# Altium footprint library RPI-Router.PcbLib: 49 footprints (part 3 of 4)
Each footprint in its own frame and in the unit in brackets; x right, y up, seen from the top. Pads: shape width x height; smd on the part's side, far side on the other; paste and mask are expansions set on the pad; w line width, h text height; cw(c..) or ccw(c..) is an arc to the next point about the centre after c.
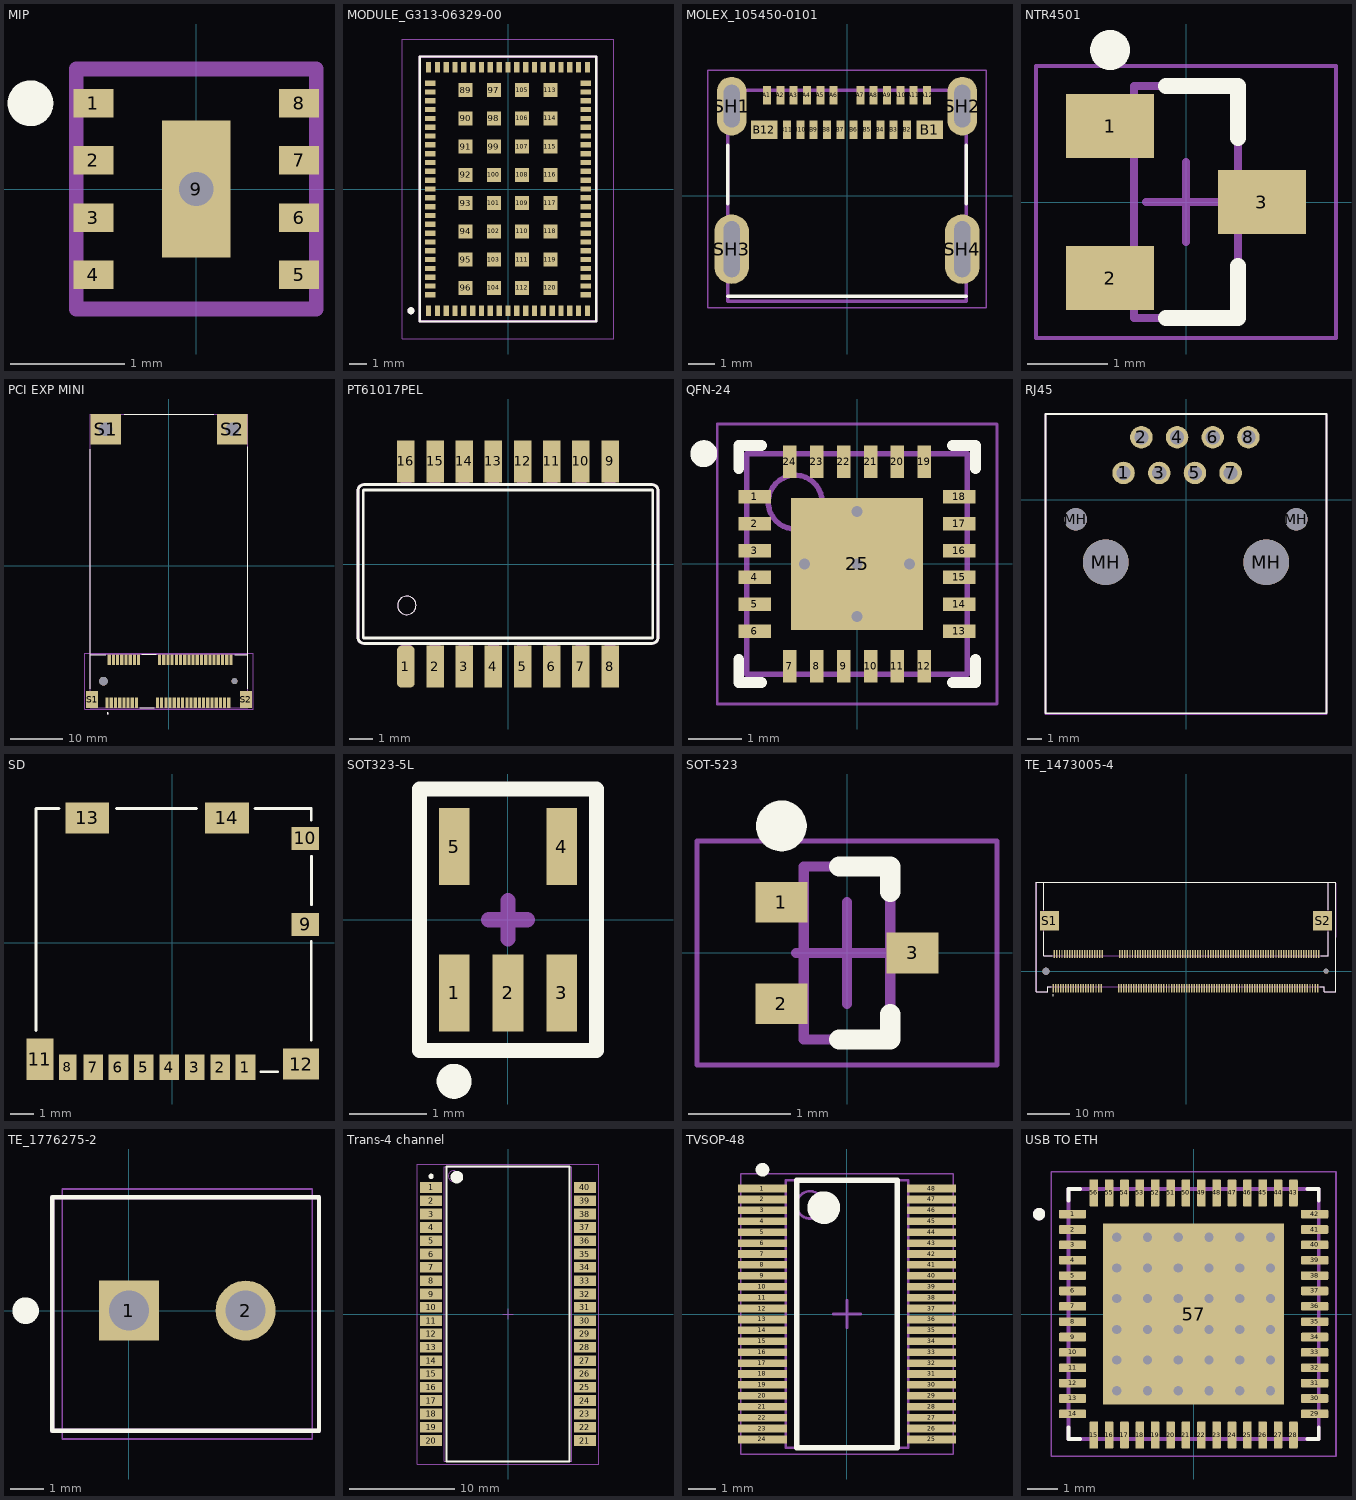
[diagram p2: the footprints below, top view; thin cyan lines are the x and y axes]

## MIP [mm]
pads (9):
  rect 0.35x0.25 smd: 1(-0.9,0.75) 2(-0.9,0.25) 3(-0.9,-0.25) 4(-0.9,-0.75) 5(0.9,-0.75) 6(0.9,-0.25) 7(0.9,0.25) 8(0.9,0.75)
  rect 0.6x1.2 smd: 9(0,0)
via 0,0 diameter 0.6 hole 0.3
Top Overlay:
  circle w0.2: c-1.45,0.75 r0.1
Top Paste:
  region: -0.28,0.41 0.28,0.41 0.28,-0.41 -0.28,-0.41
Mechanical 13:
  lines w0.127: -1.05,-1.05 -1.05,1.05 ; -1.05,-1.05 1.05,-1.05 ; -1.05,-1.05 -1.05,1.05 ; -1.05,-1.05 1.05,-1.05 ; -1.05,1.05 1.05,1.05 ; -1.05,1.05 1.05,1.05 ; 1.05,-1.05 1.05,1.05 ; 1.05,-1.05 1.05,1.05
3D body: height 0.8, standoff 0, extent -1.05,-1.05 1.05,1.05

## MODULE_G313-06329-00 [mm]
pads (120):
  rect 0.3x0.6 smd: 1(-4.5,-6.9) 2(-4,-6.9) 3(-3.5,-6.9) 4(-3,-6.9) 5(-2.5,-6.9) 6(-2,-6.9) 7(-1.5,-6.9) 8(-1,-6.9) 9(-0.5,-6.9) 10(0,-6.9) 11(0.5,-6.9) 12(1,-6.9) 13(1.5,-6.9) 14(2,-6.9) 15(2.5,-6.9) 16(3,-6.9) 17(3.5,-6.9) 18(4,-6.9) 19(4.5,-6.9) 45(4.5,6.9) 46(4,6.9) 47(3.5,6.9) 48(3,6.9) 49(2.5,6.9) 50(2,6.9) 51(1.5,6.9) 52(1,6.9) 53(0.5,6.9) 54(0,6.9) 55(-0.5,6.9) 56(-1,6.9) 57(-1.5,6.9) 58(-2,6.9) 59(-2.5,6.9) 60(-3,6.9) 61(-3.5,6.9) 62(-4,6.9) 63(-4.5,6.9)
  rect 0.6x0.3 smd: 20(4.4,-6) 21(4.4,-5.5) 22(4.4,-5) 23(4.4,-4.5) 24(4.4,-4) 25(4.4,-3.5) 26(4.4,-3) 27(4.4,-2.5) 28(4.4,-2) 29(4.4,-1.5) 30(4.4,-1) 31(4.4,-0.5) 32(4.4,0) 33(4.4,0.5) 34(4.4,1) 35(4.4,1.5) 36(4.4,2) 37(4.4,2.5) 38(4.4,3) 39(4.4,3.5) 40(4.4,4) 41(4.4,4.5) 42(4.4,5) 43(4.4,5.5) 44(4.4,6) 64(-4.4,6) 65(-4.4,5.5) 66(-4.4,5) 67(-4.4,4.5) 68(-4.4,4) 69(-4.4,3.5) 70(-4.4,3) 71(-4.4,2.5) 72(-4.4,2) 73(-4.4,1.5) 74(-4.4,1) 75(-4.4,0.5) 76(-4.4,0) 77(-4.4,-0.5) 78(-4.4,-1) 79(-4.4,-1.5) 80(-4.4,-2) 81(-4.4,-2.5) 82(-4.4,-3) 83(-4.4,-3.5) 84(-4.4,-4) 85(-4.4,-4.5) 86(-4.4,-5) 87(-4.4,-5.5) 88(-4.4,-6)
  rect 0.8x0.8 smd: 89(-2.4,5.6) 90(-2.4,4) 91(-2.4,2.4) 92(-2.4,0.8) 93(-2.4,-0.8) 94(-2.4,-2.4) 95(-2.4,-4) 96(-2.4,-5.6) 97(-0.8,5.6) 98(-0.8,4) 99(-0.8,2.4) 100(-0.8,0.8) 101(-0.8,-0.8) 102(-0.8,-2.4) 103(-0.8,-4) 104(-0.8,-5.6) 105(0.8,5.6) 106(0.8,4) 107(0.8,2.4) 108(0.8,0.8) 109(0.8,-0.8) 110(0.8,-2.4) 111(0.8,-4) 112(0.8,-5.6) 113(2.4,5.6) 114(2.4,4) 115(2.4,2.4) 116(2.4,0.8) 117(2.4,-0.8) 118(2.4,-2.4) 119(2.4,-4) 120(2.4,-5.6)
Top Overlay:
  circle w0.2: c-5.5,-6.9 r0.1
  lines w0.127: -5,-7.514 5,-7.514 5,7.514 -5,7.514 -5,-7.514
Mechanical 13:
  circle w0.2: c-5.5,-6.9 r0.1
  lines w0.127: -5,-7.5 -5,7.5 5,7.5 5,-7.5 -5,-7.5
Mechanical 15:
  lines w0.05: -6,-8.5 -6,8.5 6,8.5 6,-8.5 -6,-8.5

## MOLEX_105450-0101 [mm]
pads (28):
  rect 0.3x0.7 smd: A1(-3,3.77) A2(-2.5,3.77) A3(-2,3.77) A4(-1.5,3.77) A5(-1,3.77) A6(-0.5,3.77) A7(0.5,3.77) A8(1,3.77) A9(1.5,3.77) A10(2,3.77) A11(2.5,3.77) A12(3,3.77) B2(2.25,2.47) B3(1.75,2.47) B4(1.25,2.47) B5(0.75,2.47) B6(0.25,2.47) B7(-0.25,2.47) B8(-0.75,2.47) B9(-1.25,2.47) B10(-1.75,2.47) B11(-2.25,2.47)
  rect 1x0.7 smd: B1(3.1,2.47) B12(-3.1,2.47)
  oval 1.1x2.2 hole 0.6 slot 1.6 at 90 deg: SH1(-4.32,3.36) SH2(4.32,3.36)
  oval 1.3x2.6 hole 0.6 slot 2.1 at 90 deg: SH3(-4.32,-2) SH4(4.32,-2)
Top Overlay:
  lines w0.127: -4.47,-3.77 4.47,-3.77 ; -4.47,-0.3 -4.47,1.9 ; 4.47,-0.3 4.47,1.9
Mechanical 13:
  lines w0.127: -4.47,-3.95 4.47,-3.95 4.47,3.95 -4.47,3.95 -4.47,-3.95
Mechanical 15:
  lines w0.05: -5.22,-4.2 5.22,-4.2 5.22,4.71 -5.22,4.71 -5.22,-4.2
3D body "1054500101.stp": height 3.23, standoff -0.73, extent -4.47,-3.9 4.47,4

## NTR4501 [mm]
height 1
pads (3):
  rect 1.1x0.8 smd: 1(-0.95,0.95) 2(-0.95,-0.95) 3(0.95,0)
Top Overlay:
  circle w0.25: c-0.95,1.9 r0.125
  lines w0.2: -0.25,-1.45 0.65,-1.45 0.65,-0.8 ; -0.25,1.45 0.65,1.45 0.65,0.8
Mechanical 13:
  lines w0.1: -0.65,-1.45 0.65,-1.45 0.65,1.45 -0.65,1.45 -0.65,-1.45
Mechanical 15:
  lines w0.05: -1.875,-1.7 1.875,-1.7 1.875,1.7 -1.875,1.7 -1.875,-1.7
  lines w0.1: -0.5,0 0.5,0 ; 0,-0.5 0,0.5
3D body: height 1, standoff 0.05, extent -0.65,-1.45 0.65,1.45

## PCI EXP MINI [mm]
pads (58):
  rect 0.6x2 smd: 1(-11.8,-26.075) 2(-11.4,-17.875) 3(-11,-26.075) 4(-10.6,-17.875) 5(-10.2,-26.075) 6(-9.8,-17.875) 7(-9.4,-26.075) 8(-9,-17.875) 9(-8.6,-26.075) 10(-8.2,-17.875) 11(-7.8,-26.075) 12(-7.4,-17.875) 13(-7,-26.075) 14(-6.6,-17.875) 15(-6.2,-26.075) 16(-5.8,-17.875) 17(-2.2,-26.075) 18(-1.8,-17.875) 19(-1.4,-26.075) 20(-1,-17.875) 21(-0.6,-26.075) 22(-0.2,-17.875) 23(0.2,-26.075) 24(0.6,-17.875) 25(1,-26.075) 26(1.4,-17.875) 27(1.8,-26.075) 28(2.2,-17.875) 29(2.6,-26.075) 30(3,-17.875) 31(3.4,-26.075) 32(3.8,-17.875) 33(4.2,-26.075) 34(4.6,-17.875) 35(5,-26.075) 36(5.4,-17.875) 37(5.8,-26.075) 38(6.2,-17.875) 39(6.6,-26.075) 40(7,-17.875) 41(7.4,-26.075) 42(7.8,-17.875) 43(8.2,-26.075) 44(8.6,-17.875) 45(9,-26.075) 46(9.4,-17.875) 47(9.8,-26.075) 48(10.2,-17.875) 49(10.6,-26.075) 50(11,-17.875) 51(11.4,-26.075) 52(11.8,-17.875)
  rect 2.3x3.2 smd: S1(-14.65,-25.475) S2(14.65,-25.475)
  rect 5.8x5.8 hole 2.6: S1(-12.1,26.075) S2(12.1,26.075)
  round 1.65 hole 1.65 unplated: ""(-12.5,-21.975)
  round 1.15 hole 1.15 unplated: ""(12.5,-21.975)
Top Overlay:
  circle w0.2: c-11.712,-28.131 r0.1
  lines w0.127: -5.58,-27.075 -2.82,-27.075 ; -5.18,-16.875 -2.42,-16.875
  lines w0.2: -15,-23.4 -15,22.25 ; -15,-16.9 -12.05,-16.9 ; -8.5,28.95 8.5,28.95 ; 12.5,-16.9 15,-16.9 ; 15,-23.4 15,22.7
Mechanical 13:
  circle w0.2: c-11.712,-28.131 r0.1
  lines w0.127: -15,-23.555 -15,-16.875 ; -12.02,-16.875 -15,-16.875 ; 12.42,-16.875 15,-16.875 ; 14.998,28.975 -15,28.975 -15,-16.875 ; 15,-23.555 15,-16.875 ; 15,28.975 15,-16.875 ; -15,-16.875 15,-16.875 ; -15,-16.875 -15,-27.075 15,-27.075 15,-16.875
Mechanical 15:
  lines w0.05: -16.05,-27.325 16.05,-27.325 16.05,-16.625 -16.05,-16.625 -16.05,-27.325
3D body "679100002.stp": height 4.1, standoff -0.5, extent -15,-27.12 15,-16.92

## PT61017PEL [mil]
pads (16):
  rrect50% 30x71.5 smd: 1(-175,-175.75)
  rect 30x71.5 smd: 2(-125,-175.75) 3(-75,-175.75) 4(-25,-175.75) 5(25,-175.75) 6(75,-175.75) 7(125,-175.75) 8(175,-175.75) 9(175,175.75) 10(125,175.75) 11(75,175.75) 12(25,175.75) 13(-25,175.75) 14(-75,175.75) 15(-125,175.75) 16(-175,175.75)
Top Overlay:
  circle w0: c-173.23,-70.87 r15.75
  lines w5: -256.89,-125.83 ccw(c-246.89,-125.83) -246.89,-135.83 246.89,-135.83 ccw(c246.89,-125.83) 256.89,-125.83 256.89,125.83 ccw(c246.89,125.83) 246.89,135.83 -246.89,135.83 ccw(c-246.89,125.83) -256.89,125.83 -256.89,-125.83 ; -247.83,-124.8 ccw(c-245.87,-124.8) -245.87,-126.77 245.87,-126.77 ccw(c245.87,-124.8) 247.83,-124.8 247.83,124.8 ccw(c245.87,124.8) 245.87,126.77 -245.87,126.77 ccw(c-245.87,124.8) -247.83,124.8 -247.83,-124.8
Mechanical 13:
  circle w0: c-173.23,-70.87 r15.75
  region: 184.06,135.83 165.94,135.83 165.94,183.07 184.06,183.07
  region: 134.06,135.83 115.94,135.83 115.94,183.07 134.06,183.07
  region: 84.06,135.83 65.94,135.83 65.94,183.07 84.06,183.07
  region: 34.06,135.83 15.94,135.83 15.94,183.07 34.06,183.07
  region: -165.94,135.83 -184.06,135.83 -184.06,183.07 -165.94,183.07
  region: -115.94,135.83 -134.06,135.83 -134.06,183.07 -115.94,183.07
  region: -65.94,135.83 -84.06,135.83 -84.06,183.07 -65.94,183.07
  region: -15.94,135.83 -34.06,135.83 -34.06,183.07 -15.94,183.07
  region: 184.06,-183.07 165.94,-183.07 165.94,-135.83 184.06,-135.83
  region: 134.06,-183.07 115.94,-183.07 115.94,-135.83 134.06,-135.83
  region: 84.06,-183.07 65.94,-183.07 65.94,-135.83 84.06,-135.83
  region: 34.06,-183.07 15.94,-183.07 15.94,-135.83 34.06,-135.83
  region: -165.94,-183.07 -184.06,-183.07 -184.06,-135.83 -165.94,-135.83
  region: -115.94,-183.07 -134.06,-183.07 -134.06,-135.83 -115.94,-135.83
  region: -65.94,-183.07 -84.06,-183.07 -84.06,-135.83 -65.94,-135.83
  region: -15.94,-183.07 -34.06,-183.07 -34.06,-135.83 -15.94,-135.83
  lines w5: -256.89,-125.83 ccw(c-246.89,-125.83) -246.89,-135.83 246.89,-135.83 ccw(c246.89,-125.83) 256.89,-125.83 256.89,125.83 ccw(c246.89,125.83) 246.89,135.83 -246.89,135.83 ccw(c-246.89,125.83) -256.89,125.83 -256.89,-125.83
3D body "PT61017PEL.stp": height 204.72, standoff -5.34, extent -253.65,-175 249.65,175.02

## QFN-24 [mm]
height 1
pads (25):
  rect 0.6x0.25 smd: 1(-1.9,1.25) 2(-1.9,0.75) 3(-1.9,0.25) 4(-1.9,-0.25) 5(-1.9,-0.75) 6(-1.9,-1.25) 13(1.9,-1.25) 14(1.9,-0.75) 15(1.9,-0.25) 16(1.9,0.25) 17(1.9,0.75) 18(1.9,1.25)
  rect 0.25x0.6 smd: 7(-1.25,-1.9) 8(-0.75,-1.9) 9(-0.25,-1.9) 10(0.25,-1.9) 11(0.75,-1.9) 12(1.25,-1.9) 19(1.25,1.9) 20(0.75,1.9) 21(0.25,1.9) 22(-0.25,1.9) 23(-0.75,1.9) 24(-1.25,1.9)
  rect 2.45x2.45 smd: 25(0,0)
via 0,0 diameter 0.5 hole 0.2
via 0,0.975 diameter 0.5 hole 0.2
via 0.975,0 diameter 0.5 hole 0.2
via -0.975,0 diameter 0.5 hole 0.2
via 0,-0.975 diameter 0.5 hole 0.2
Top Overlay:
  circle w0.25: c-2.85,2.05 r0.125
  lines w0.2: -2.2,-1.775 -2.2,-2.2 -1.775,-2.2 ; -2.2,1.775 -2.2,2.2 -1.775,2.2 ; 1.775,-2.2 2.2,-2.2 2.2,-1.775 ; 1.775,2.2 2.2,2.2 2.2,1.775
Mechanical 13:
  circle w0.1: c-1.15,1.15 r0.5
  lines w0.1: -2.05,-2.05 -2.05,2.05 2.05,2.05 2.05,-2.05 -2.05,-2.05
Mechanical 15:
  lines w0.05: -2.6,-2.6 -2.6,2.6 2.6,2.6 2.6,-2.6 -2.6,-2.6
  lines w0.1: -0.5,0 0.5,0 ; 0,-0.5 0,0.5
3D body: height 1, standoff 0.01, extent -2.05,-2.05 2.05,2.05

## RJ45 [mm]
pads (12):
  round 1.6 hole 1: 1(-4.445,1.905) 2(-3.175,4.445) 3(-1.905,1.905) 4(-0.635,4.445) 5(0.635,1.905) 6(1.905,4.445) 7(3.175,1.905) 8(4.445,4.445)
  round 1.6 hole 1.6 unplated: MH(-7.85,-1.395) MH(7.85,-1.395)
  round 3.25 hole 3.25 unplated: MH(-5.715,-4.445) MH(5.715,-4.445)
Top Overlay:
  lines w0.127: -10,-15.2 10,-15.2 10,6.1 -10,6.1 -10,-15.2
Mechanical 13:
  lines w0.127: -10,-15.25 10,-15.25 10,6.1 -10,6.1 -10,-15.25
3D body "c-5-2301994-4-a-3d.stp": height 15.6, standoff -3.7, extent -10,-15.25 10,6.1

## SD [mm]
pads (14):
  rect 0.85x1.1 smd: 1(3.163,-5.402) 2(2.063,-5.402) 3(0.962,-5.402) 4(-0.138,-5.402) 5(-1.237,-5.402) 6(-2.337,-5.402) 7(-3.437,-5.402)
  rect 0.75x1.1 smd: 8(-4.537,-5.402)
  rect 1.2x1 smd: 9(5.748,0.788) 10(5.748,4.518)
  rect 1.17x1.8 smd: 11(-5.747,-5.057)
  rect 1.55x1.35 smd: 12(5.573,-5.262)
  rect 1.9x1.35 smd: 13(-3.692,5.402) 14(2.358,5.402)
Top Overlay:
  lines w0.127: -5.907,-3.797 -5.907,5.818 -4.912,5.818 ; -2.432,5.818 1.038,5.818 ; 3.568,5.803 6.013,5.803 6.013,5.308 ; 3.828,-5.592 4.558,-5.592 ; 6.013,-4.217 6.013,0.058 ; 6.028,1.643 6.028,3.743
3D body "1040310811.stp": height 1.44, standoff -0.01, extent -5.927,-5.598 6.023,5.802

## SOT323-5L [mm] "Surface Mount/ SOT323"
height 0.025
pads (5):
  rect 0.4x1 smd: 1(-0.7,-0.95) 2(0,-0.95) 3(0.7,-0.95) 4(0.7,0.95) 5(-0.7,0.95)
Top Overlay:
  circle w0.254: c-0.7,-2.1 r0.1
  lines w0.2: -1.15,-1.7 1.15,-1.7 1.15,1.7 -1.15,1.7 -1.15,-1.7
Mechanical 3:
  lines w0.2: -0.25,0 0.25,0 ; 0,-0.25 0,0.25
3D body: height 1.1, standoff 0, extent -1.1,-0.675 1.1,0.675

## SOT-523 [mm]
height 0.8
pads (3):
  rect 0.51x0.4 smd: 1(-0.645,0.5) 2(-0.645,-0.5) 3(0.645,0)
Top Overlay:
  circle w0.25: c-0.645,1.25 r0.125
  lines w0.2: -0.075,-0.85 0.425,-0.85 0.425,-0.6 ; -0.075,0.85 0.425,0.85 0.425,0.6
Mechanical 13:
  lines w0.1: -0.425,-0.85 0.425,-0.85 0.425,0.85 -0.425,0.85 -0.425,-0.85
Mechanical 15:
  lines w0.05: -1.475,-1.1 1.475,-1.1 1.475,1.1 -1.475,1.1 -1.475,-1.1
  lines w0.1: -0.5,0 0.5,0 ; 0,-0.5 0,0.5
3D body: height 0.8, standoff 0.05, extent -0.425,-0.85 0.425,0.85

## TE_1473005-4 [mm]
pads (204):
  rect 0.35x2 smd: 1(-31.65,-4.1) 2(-31.35,4.1) 3(-31.05,-4.1) 4(-30.75,4.1) 5(-30.45,-4.1) 6(-30.15,4.1) 7(-29.85,-4.1) 8(-29.55,4.1) 9(-29.25,-4.1) 10(-28.95,4.1) 11(-28.65,-4.1) 12(-28.35,4.1) 13(-28.05,-4.1) 14(-27.75,4.1) 15(-27.45,-4.1) 16(-27.15,4.1) 17(-26.85,-4.1) 18(-26.55,4.1) 19(-26.25,-4.1) 20(-25.95,4.1) 21(-25.65,-4.1) 22(-25.35,4.1) 23(-25.05,-4.1) 24(-24.75,4.1) 25(-24.45,-4.1) 26(-24.15,4.1) 27(-23.85,-4.1) 28(-23.55,4.1) 29(-23.25,-4.1) 30(-22.95,4.1) 31(-22.65,-4.1) 32(-22.35,4.1) 33(-22.05,-4.1) 34(-21.75,4.1) 35(-21.45,-4.1) 36(-21.15,4.1) 37(-20.85,-4.1) 38(-20.55,4.1) 39(-20.25,-4.1) 40(-19.95,4.1) 41(-16.05,-4.1) 42(-15.75,4.1) 43(-15.45,-4.1) 44(-15.15,4.1) 45(-14.85,-4.1) 46(-14.55,4.1) 47(-14.25,-4.1) 48(-13.95,4.1) 49(-13.65,-4.1) 50(-13.35,4.1) 51(-13.05,-4.1) 52(-12.75,4.1) 53(-12.45,-4.1) 54(-12.15,4.1) 55(-11.85,-4.1) 56(-11.55,4.1) 57(-11.25,-4.1) 58(-10.95,4.1) 59(-10.65,-4.1) 60(-10.35,4.1) 61(-10.05,-4.1) 62(-9.75,4.1) 63(-9.45,-4.1) 64(-9.15,4.1) 65(-8.85,-4.1) 66(-8.55,4.1) 67(-8.25,-4.1) 68(-7.95,4.1) 69(-7.65,-4.1) 70(-7.35,4.1) 71(-7.05,-4.1) 72(-6.75,4.1) 73(-6.45,-4.1) 74(-6.15,4.1) 75(-5.85,-4.1) 76(-5.55,4.1) 77(-5.25,-4.1) 78(-4.95,4.1) 79(-4.65,-4.1) 80(-4.35,4.1) 81(-4.05,-4.1) 82(-3.75,4.1) 83(-3.45,-4.1) 84(-3.15,4.1) 85(-2.85,-4.1) 86(-2.55,4.1) 87(-2.25,-4.1) 88(-1.95,4.1) 89(-1.65,-4.1) 90(-1.35,4.1) 91(-1.05,-4.1) 92(-0.75,4.1) 93(-0.45,-4.1) 94(-0.15,4.1) 95(0.15,-4.1) 96(0.45,4.1) 97(0.75,-4.1) 98(1.05,4.1) 99(1.35,-4.1) 100(1.65,4.1) 101(1.95,-4.1) 102(2.25,4.1) 103(2.55,-4.1) 104(2.85,4.1) 105(3.15,-4.1) 106(3.45,4.1) 107(3.75,-4.1) 108(4.05,4.1) 109(4.35,-4.1) 110(4.65,4.1) 111(4.95,-4.1) 112(5.25,4.1) 113(5.55,-4.1) 114(5.85,4.1) 115(6.15,-4.1) 116(6.45,4.1) 117(6.75,-4.1) 118(7.05,4.1) 119(7.35,-4.1) 120(7.65,4.1) 121(7.95,-4.1) 122(8.25,4.1) 123(8.55,-4.1) 124(8.85,4.1) 125(9.15,-4.1) 126(9.45,4.1) 127(9.75,-4.1) 128(10.05,4.1) 129(10.35,-4.1) 130(10.65,4.1) 131(10.95,-4.1) 132(11.25,4.1) 133(11.55,-4.1) 134(11.85,4.1) 135(12.15,-4.1) 136(12.45,4.1) 137(12.75,-4.1) 138(13.05,4.1) 139(13.35,-4.1) 140(13.65,4.1) 141(13.95,-4.1) 142(14.25,4.1) 143(14.55,-4.1) 144(14.85,4.1) 145(15.15,-4.1) 146(15.45,4.1) 147(15.75,-4.1) 148(16.05,4.1) 149(16.35,-4.1) 150(16.65,4.1) 151(16.95,-4.1) 152(17.25,4.1) 153(17.55,-4.1) 154(17.85,4.1) 155(18.15,-4.1) 156(18.45,4.1) 157(18.75,-4.1) 158(19.05,4.1) 159(19.35,-4.1) 160(19.65,4.1) 161(19.95,-4.1) 162(20.25,4.1) 163(20.55,-4.1) 164(20.85,4.1) 165(21.15,-4.1) 166(21.45,4.1) 167(21.75,-4.1) 168(22.05,4.1) 169(22.35,-4.1) 170(22.65,4.1) 171(22.95,-4.1) 172(23.25,4.1) 173(23.55,-4.1) 174(23.85,4.1) 175(24.15,-4.1) 176(24.45,4.1) 177(24.75,-4.1) 178(25.05,4.1) 179(25.35,-4.1) 180(25.65,4.1) 181(25.95,-4.1) 182(26.25,4.1) 183(26.55,-4.1) 184(26.85,4.1) 185(27.15,-4.1) 186(27.45,4.1) 187(27.75,-4.1) 188(28.05,4.1) 189(28.35,-4.1) 190(28.65,4.1) 191(28.95,-4.1) 192(29.25,4.1) 193(29.55,-4.1) 194(29.85,4.1) 195(30.15,-4.1) 196(30.45,4.1) 197(30.75,-4.1) 198(31.05,4.1) 199(31.35,-4.1) 200(31.65,4.1)
  rect 4.5x4.6 smd: S1(-32.55,12) S2(32.55,12)
  round 1.7 hole 1.7 unplated: ""(-33.4,0)
  round 1.2 hole 1.2 unplated: ""(33.4,0)
Top Overlay:
  circle w0.2: c-31.682,-5.7 r0.1
  lines w0.127: -33.95,9.38 -33.95,3.7 -31.845,3.7 ; -33.95,14.62 -33.95,21.158 ; -32.145,-3.7 -33,-3.7 -33,-4.877 -35.738,-4.877 -35.738,1.85 -35.738,21.158 -33.95,21.158 ; 31.845,-3.7 33,-3.7 33,-4.897 35.738,-4.897 35.738,1.85 35.738,21.158 33.95,21.158 ; 32.145,3.7 33.95,3.7 33.95,9.38 ; 33.95,14.62 33.95,21.158 ; -33.95,21.158 33.95,21.158
Mechanical 13:
  lines w0.127: -35.75,21 -35.738,-4.851 ; 33.96,10 33.95,10 ; 35.75,21 35.738,-4.897 ; -33.95,21.158 -35.738,21.158 -35.738,1.85 -35.738,-4.877 -33,-4.877 -33,-3.7 33,-3.7 33,-4.897 35.738,-4.897 ; -33.95,21.158 -33.95,14 -31.65,14 -31.65,10 -33.95,10 -33.95,3.7 33.95,3.7 33.95,10 ; -33.95,21.158 33.95,21.158 ; 33.95,10 31.65,10 31.65,14 33.95,14 33.95,21.158 ; 33.95,21.158 35.738,21.158 35.738,1.85 35.738,-4.897
3D body "c-1473005-4-j1-3d.stp": height 5.27, standoff -0.63, extent -35.738,-4.897 35.762,21.153

## TE_1776275-2 [mm]
pads (2):
  rect 1.8x1.8 hole 1.2: 1(0,0)
  round 1.8 hole 1.2: 2(3.5,0)
Top Overlay:
  circle w0.4: c-3.1,0 r0.2
  lines w0.127: -2.3,-3.6 5.7,-3.6 5.7,3.4 -2.3,3.4 -2.3,-3.6
Mechanical 13:
  circle w0.4: c0,0 r0.2
  lines w0.127: -2.3,-3.6 5.7,-3.6 5.7,3.4 -2.3,3.4 -2.3,-3.6
Mechanical 15:
  lines w0.05: -2,-3.85 5.5,-3.85 5.5,3.65 -2,3.65 -2,-3.85
3D body "c-1776275-2-a-3d.stp": height 8.6, standoff -3.9, extent -2.3,-3.6 5.7,3.4

## Trans-4 channel [mm] "SOIC, 40-Leads, Body 28.10x12.20mm, Pitch 1.27mm, IPC Medium Density"
height 5.72
pads (40):
  rect 2.095x1.02 smd: 1(-7.332,12.065) 2(-7.332,10.795) 3(-7.332,9.525) 4(-7.332,8.255) 5(-7.332,6.985) 6(-7.332,5.715) 7(-7.332,4.445) 8(-7.332,3.175) 9(-7.332,1.905) 10(-7.332,0.635) 11(-7.332,-0.635) 12(-7.332,-1.905) 13(-7.332,-3.175) 14(-7.332,-4.445) 15(-7.332,-5.715) 16(-7.332,-6.985) 17(-7.332,-8.255) 18(-7.332,-9.525) 19(-7.332,-10.795) 20(-7.332,-12.065) 21(7.332,-12.065) 22(7.332,-10.795) 23(7.332,-9.525) 24(7.332,-8.255) 25(7.332,-6.985) 26(7.332,-5.715) 27(7.332,-4.445) 28(7.332,-3.175) 29(7.332,-1.905) 30(7.332,-0.635) 31(7.332,0.635) 32(7.332,1.905) 33(7.332,3.175) 34(7.332,4.445) 35(7.332,5.715) 36(7.332,6.985) 37(7.332,8.255) 38(7.332,9.525) 39(7.332,10.795) 40(7.332,12.065)
Top Overlay:
  circle w0.6: c-4.875,13.05 r0.3
  circle w0.25: c-7.332,13.125 r0.125
  lines w0.2: -5.875,-14.05 5.875,-14.05 5.875,14.05 -5.875,14.05 -5.875,-14.05
Mechanical 13:
  circle w0.1: c-5.2,13.15 r0.5
  lines w0.1: -6.1,-14.05 6.1,-14.05 6.1,14.05 -6.1,14.05 -6.1,-14.05
Mechanical 15:
  lines w0.05: -8.675,-14.3 8.675,-14.3 8.675,14.3 -8.675,14.3 -8.675,-14.3
  lines w0.1: -0.5,0 0.5,0 ; 0,-0.5 0,0.5
3D body: height 5.72, standoff 5.72, extent -6.1,-14.05 6.1,14.05

## TVSOP-48 [mm]
height 1.2
pads (48):
  rect 1.8x0.28 smd: 1(-3.1,4.6) 2(-3.1,4.2) 3(-3.1,3.8) 4(-3.1,3.4) 5(-3.1,3) 6(-3.1,2.6) 7(-3.1,2.2) 8(-3.1,1.8) 9(-3.1,1.4) 10(-3.1,1) 11(-3.1,0.6) 12(-3.1,0.2) 13(-3.1,-0.2) 14(-3.1,-0.6) 15(-3.1,-1) 16(-3.1,-1.4) 17(-3.1,-1.8) 18(-3.1,-2.2) 19(-3.1,-2.6) 20(-3.1,-3) 21(-3.1,-3.4) 22(-3.1,-3.8) 23(-3.1,-4.2) 24(-3.1,-4.6) 25(3.1,-4.6) 26(3.1,-4.2) 27(3.1,-3.8) 28(3.1,-3.4) 29(3.1,-3) 30(3.1,-2.6) 31(3.1,-2.2) 32(3.1,-1.8) 33(3.1,-1.4) 34(3.1,-1) 35(3.1,-0.6) 36(3.1,-0.2) 37(3.1,0.2) 38(3.1,0.6) 39(3.1,1) 40(3.1,1.4) 41(3.1,1.8) 42(3.1,2.2) 43(3.1,2.6) 44(3.1,3) 45(3.1,3.4) 46(3.1,3.8) 47(3.1,4.2) 48(3.1,4.6)
Top Overlay:
  circle w0.25: c-3.1,5.29 r0.125
  circle w0.6: c-0.85,3.9 r0.3
  lines w0.2: -1.85,-4.9 -1.85,4.9 1.85,4.9 1.85,-4.9 -1.85,-4.9
Mechanical 13:
  circle w0.1: c-1.35,4 r0.5
  lines w0.1: -2.25,-4.9 -2.25,4.9 2.25,4.9 2.25,-4.9 -2.25,-4.9
Mechanical 15:
  lines w0.05: -3.9,-5.15 -3.9,5.15 3.9,5.15 3.9,-5.15 -3.9,-5.15
  lines w0.1: -0.5,0 0.5,0 ; 0,-0.5 0,0.5
3D body: height 1.2, standoff 0.1, extent -2.25,-4.9 2.25,4.9

## USB TO ETH [mm]
pads (93):
  rrect25% 0.89x0.28 smd: 1(-3.94,3.25) 2(-3.94,2.75) 3(-3.94,2.25) 4(-3.94,1.75) 5(-3.94,1.25) 6(-3.94,0.75) 7(-3.94,0.25) 8(-3.94,-0.25) 9(-3.94,-0.75) 10(-3.94,-1.25) 11(-3.94,-1.75) 12(-3.94,-2.25) 13(-3.94,-2.75) 14(-3.94,-3.25) 29(3.94,-3.25) 30(3.94,-2.75) 31(3.94,-2.25) 32(3.94,-1.75) 33(3.94,-1.25) 34(3.94,-0.75) 35(3.94,-0.25) 36(3.94,0.25) 37(3.94,0.75) 38(3.94,1.25) 39(3.94,1.75) 40(3.94,2.25) 41(3.94,2.75) 42(3.94,3.25)
  rrect25% 0.28x0.89 smd: 15(-3.25,-3.94) 16(-2.75,-3.94) 17(-2.25,-3.94) 18(-1.75,-3.94) 19(-1.25,-3.94) 20(-0.75,-3.94) 21(-0.25,-3.94) 22(0.25,-3.94) 23(0.75,-3.94) 24(1.25,-3.94) 25(1.75,-3.94) 26(2.25,-3.94) 27(2.75,-3.94) 28(3.25,-3.94) 43(3.25,3.94) 44(2.75,3.94) 45(2.25,3.94) 46(1.75,3.94) 47(1.25,3.94) 48(0.75,3.94) 49(0.25,3.94) 50(-0.25,3.94) 51(-0.75,3.94) 52(-1.25,3.94) 53(-1.75,3.94) 54(-2.25,3.94) 55(-2.75,3.94) 56(-3.25,3.94)
  rect 5.9x5.9 smd paste-4: 57(0,0)
  round 0.4 hole 0.3: 57_1(-2.5,2.5) 57_2(-1.5,2.5) 57_3(-0.5,2.5) 57_4(0.5,2.5) 57_5(1.5,2.5) 57_6(2.5,2.5) 57_7(-2.5,1.5) 57_8(-1.5,1.5) 57_9(-0.5,1.5) 57_10(0.5,1.5) 57_11(1.5,1.5) 57_12(2.5,1.5) 57_13(-2.5,0.5) 57_14(-1.5,0.5) 57_15(-0.5,0.5) 57_16(0.5,0.5) 57_17(1.5,0.5) 57_18(2.5,0.5) 57_19(-2.5,-0.5) 57_20(-1.5,-0.5) 57_21(-0.5,-0.5) 57_22(0.5,-0.5) 57_23(1.5,-0.5) 57_24(2.5,-0.5) 57_25(-2.5,-1.5) 57_26(-1.5,-1.5) 57_27(-0.5,-1.5) 57_28(0.5,-1.5) 57_29(1.5,-1.5) 57_30(2.5,-1.5) 57_31(-2.5,-2.5) 57_32(-1.5,-2.5) 57_33(-0.5,-2.5) 57_34(0.5,-2.5) 57_35(1.5,-2.5) 57_36(2.5,-2.5)
Top Overlay:
  circle w0.2: c-5.03,3.25 r0.1
  lines w0.127: -4.075,-3.7 -4.075,-4.075 -3.7,-4.075 ; -4.075,3.7 -4.075,4.075 -3.7,4.075 ; 3.7,-4.075 4.075,-4.075 4.075,-3.7 ; 3.7,4.075 4.075,4.075 4.075,3.7
Top Paste:
  circle w0: c0,0 r0.35
  circle w0: c-1,0 r0.35
  circle w0: c-2,0 r0.35
  circle w0: c1,0 r0.35
  circle w0: c2,0 r0.35
  circle w0: c0,1 r0.35
  circle w0: c-1,1 r0.35
  circle w0: c-2,1 r0.35
  circle w0: c1,1 r0.35
  circle w0: c2,1 r0.35
  circle w0: c0,2 r0.35
  circle w0: c-1,2 r0.35
  circle w0: c-2,2 r0.35
  circle w0: c1,2 r0.35
  circle w0: c2,2 r0.35
  circle w0: c0,-1 r0.35
  circle w0: c-1,-1 r0.35
  circle w0: c-2,-1 r0.35
  circle w0: c1,-1 r0.35
  circle w0: c2,-1 r0.35
  circle w0: c0,-2 r0.35
  circle w0: c-1,-2 r0.35
  circle w0: c-2,-2 r0.35
  circle w0: c1,-2 r0.35
  circle w0: c2,-2 r0.35
Mechanical 13:
  circle w0.2: c-5.03,3.25 r0.1
  lines w0.127: -4.075,-4.075 4.075,-4.075 4.075,4.075 -4.075,4.075 -4.075,-4.075
Mechanical 15:
  lines w0.05: -4.635,-4.635 4.635,-4.635 4.635,4.635 -4.635,4.635 -4.635,-4.635
3D body: height 1, standoff 0, extent -4.075,-4.075 4.075,4.075